# Altium footprint library TPS51388VABR.PcbLib: 1 footprints
Each footprint in its own frame and in the unit in brackets; x right, y up, seen from the top. Pads: shape width x height; smd on the part's side, far side on the other; paste and mask are expansions set on the pad; w line width, h text height; cw(c..) or ccw(c..) is an arc to the next point about the centre after c.
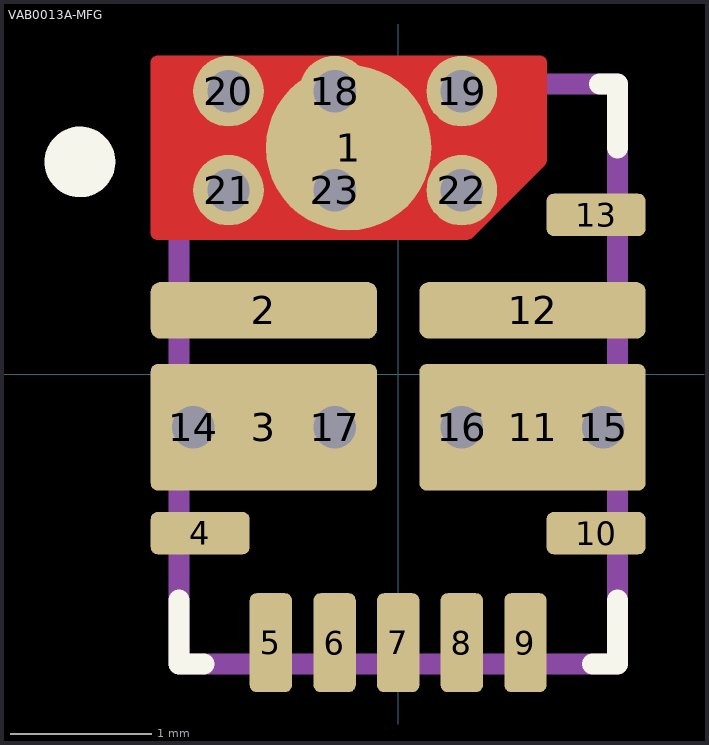
[diagram p0: the footprint, top view; thin cyan lines are the x and y axes]

## VAB0013A-MFG [mm]
pads (23):
  round 1.17 smd paste-0.572 mask-0.572: 1(-0.35,1.6)
  rrect33% 1.6x0.4 smd paste-2539.97 mask-2539.97: 2(-0.95,0.45) 12(0.95,0.45)
  rrect11% 1.6x0.895 smd paste-0.448 mask-0.448: 3(-0.95,-0.377) 11(0.95,-0.377)
  rrect33% 0.7x0.3 smd paste-2539.97 mask-2539.97: 4(-1.4,-1.125) 10(1.4,-1.125) 13(1.4,1.125)
  rrect33% 0.3x0.7 smd paste-2539.97 mask-2539.97: 5(-0.9,-1.9) 6(-0.45,-1.9) 7(0,-1.9) 8(0.45,-1.9) 9(0.9,-1.9)
  round 0.5 / inner oval 1.5x1.524 / far side round 0.5 hole 0.3 paste-2539.97 mask-0.5: 14(-1.45,-0.377) 15(1.45,-0.377) 16(0.45,-0.377) 17(-0.45,-0.377) 18(-0.45,2) 19(0.45,2) 20(-1.2,2) 21(-1.2,1.3) 22(0.45,1.3) 23(-0.45,1.3)
Top Layer:
  region: -1.7,2.25 1,2.25 1.01,2.25 1.028,2.242 1.042,2.228 1.05,2.21 1.05,2.2 1.05,1.511 1.05,1.506 1.048,1.497 1.044,1.488 1.039,1.479 1.035,1.476 0.524,0.965 0.521,0.961 0.512,0.956 0.503,0.952 0.494,0.95 0.489,0.95 -1.7,0.95 -1.71,0.95 -1.728,0.958 -1.742,0.972 -1.75,0.99 -1.75,1 -1.75,2.2 -1.75,2.21 -1.742,2.228 -1.728,2.242 -1.71,2.25
Top Overlay:
  circle w0.25: c-2.25,1.5 r0.125
  lines w0.15: -1.55,-1.6 -1.55,-2.05 -1.375,-2.05 ; 1.375,-2.05 1.55,-2.05 1.55,-1.6 ; 1.425,2.05 1.55,2.05 1.55,1.6
Top Paste:
  drawing of 27 lines, arcs and shapes, not listed
Top Solder:
  drawing of 13 lines, arcs and shapes, not listed
Top Component Outline:
  lines w0.15: -1.55,-2.05 1.55,-2.05 1.55,2.05 -1.55,2.05 -1.55,-2.05
3D body "VAB0013A.stp": height 1, standoff 0, extent -1.5,-2 1.5,2